# Altium footprint library UCP.PcbLib: 222 footprints (part 12 of 14)
Each footprint in its own frame and in the unit in brackets; x right, y up, seen from the top. Pads: shape width x height; smd on the part's side, far side on the other; paste and mask are expansions set on the pad; w line width, h text height; cw(c..) or ccw(c..) is an arc to the next point about the centre after c.
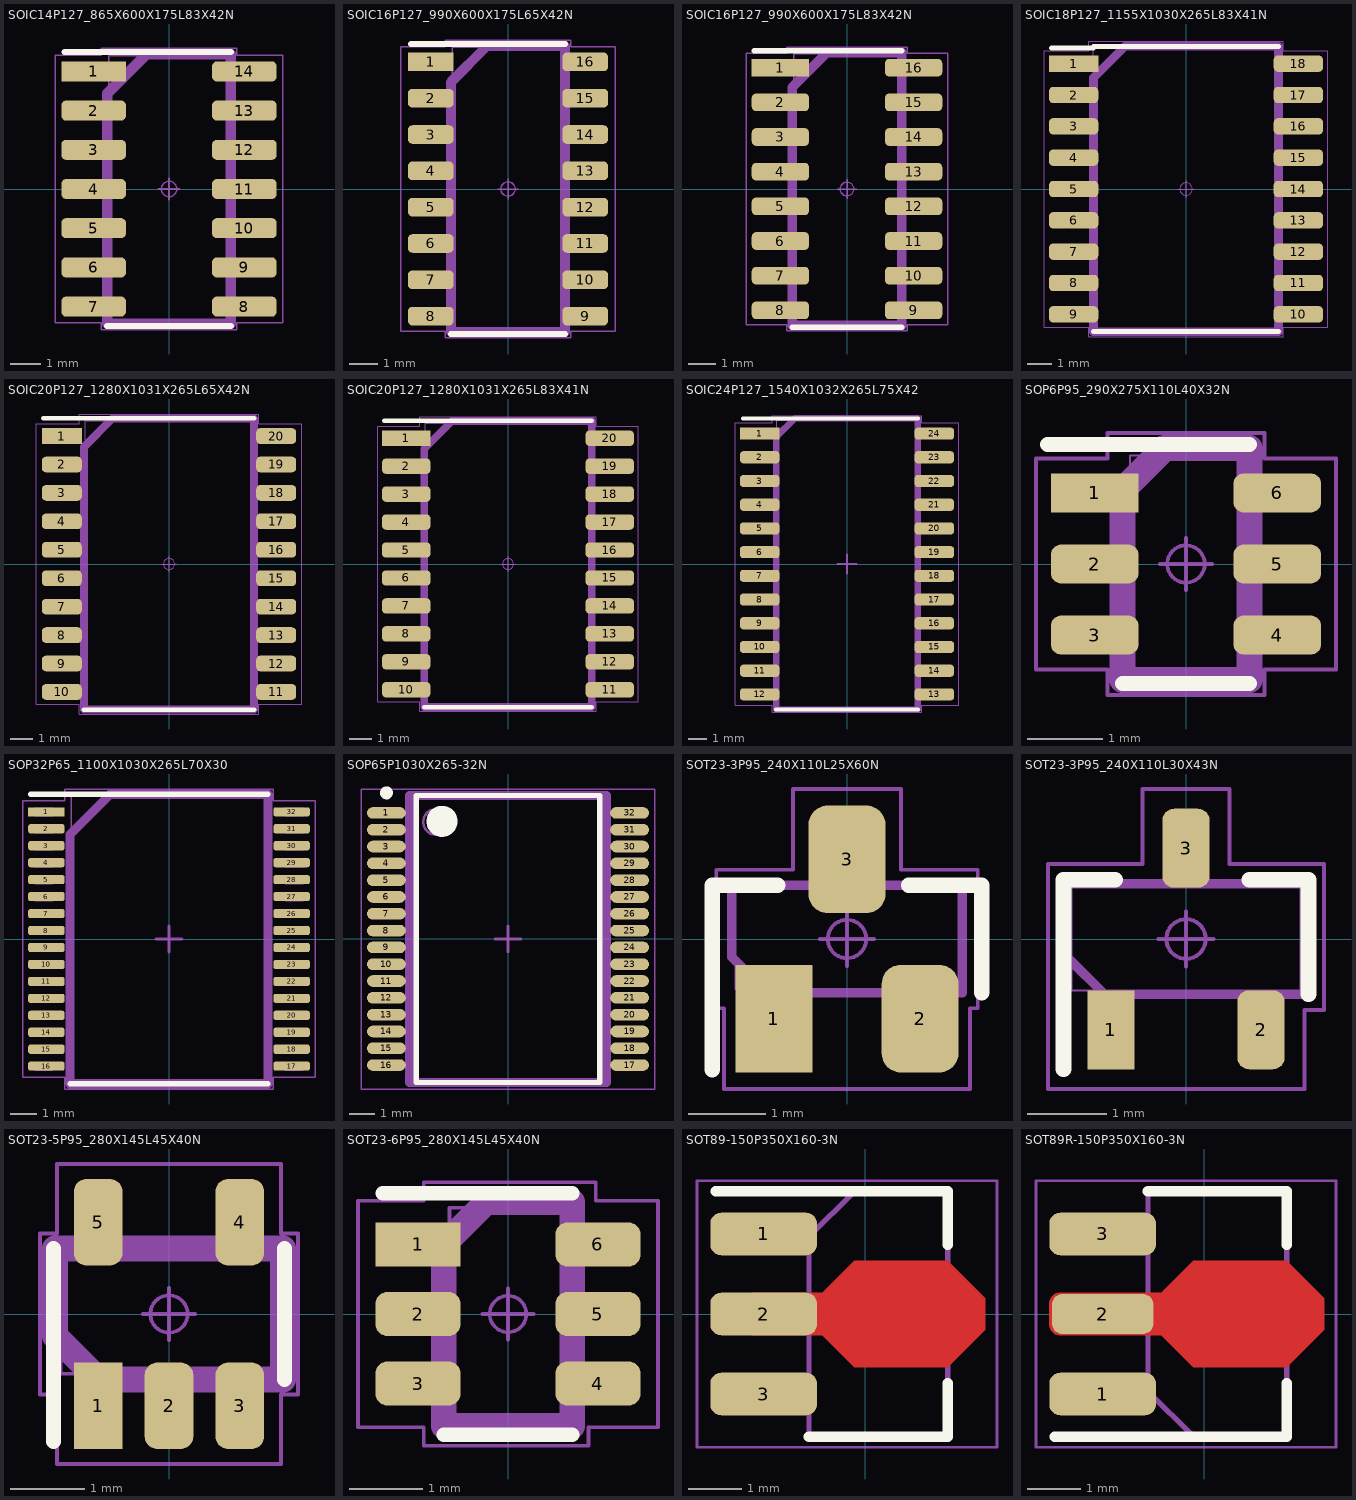
[diagram p11: the footprints below, top view; thin cyan lines are the x and y axes]

## SOIC14P127_865X600X175L83X42N [mm] "Small Outline IC (SOIC), 1.27 mm pitch; 14 pin, 8.65 mm L X 3.90 mm W X 1.75 mm H body"
height 1.75
pads (14):
  rect 2.1x0.65 smd: 1(-2.44,3.81)
  rrect49% 2.1x0.65 smd: 2(-2.44,2.54) 3(-2.44,1.27) 4(-2.44,0) 5(-2.44,-1.27) 6(-2.44,-2.54) 7(-2.44,-3.81) 8(2.44,-3.81) 9(2.44,-2.54) 10(2.44,-1.27) 11(2.44,0) 12(2.44,1.27) 13(2.44,2.54) 14(2.44,3.81)
Top Overlay:
  lines w0.2: -3.39,4.435 -2,4.435 2,4.435 ; -2,-4.435 2,-4.435
Top Designator:
  text ".Designator" at -4.511,-0.453 h2
Top Assembly:
  lines w0.35: -2,-4.365 -2,3.095 -0.73,4.365 2,4.365 2,-4.365 -2,-4.365
Top Courtyard:
  circle w0.05: c0,0 r0.25
  lines w0.05: -0.35,0 0.35,0 ; 0,-0.35 0,0.35 ; -3.69,-4.335 -3.69,4.335 -2.2,4.335 -2.2,4.565 2.2,4.565 2.2,4.335 3.69,4.335 3.69,-4.335 2.2,-4.335 2.2,-4.565 -2.2,-4.565 -2.2,-4.335 -3.69,-4.335
Top Component Outline:
  lines w0.05: -1.95,-4.315 -1.95,4.315 1.95,4.315 1.95,-4.315 -1.95,-4.315
Top Component Terminal:
  lines w0.05: -3,-4.02 -3,-3.6 -2.165,-3.6 -2.165,-4.02 -3,-4.02 ; -3,-2.75 -3,-2.33 -2.165,-2.33 -2.165,-2.75 -3,-2.75 ; -3,-1.48 -3,-1.06 -2.165,-1.06 -2.165,-1.48 -3,-1.48 ; -3,-0.21 -3,0.21 -2.165,0.21 -2.165,-0.21 -3,-0.21 ; -3,1.06 -3,1.48 -2.165,1.48 -2.165,1.06 -3,1.06 ; -3,2.33 -3,2.75 -2.165,2.75 -2.165,2.33 -3,2.33 ; -3,3.6 -3,4.02 -2.165,4.02 -2.165,3.6 -3,3.6 ; 2.165,-4.02 3,-4.02 3,-3.6 2.165,-3.6 2.165,-4.02 ; 2.165,-2.75 3,-2.75 3,-2.33 2.165,-2.33 2.165,-2.75 ; 2.165,-1.48 3,-1.48 3,-1.06 2.165,-1.06 2.165,-1.48 ; 2.165,-0.21 3,-0.21 3,0.21 2.165,0.21 2.165,-0.21 ; 2.165,1.06 3,1.06 3,1.48 2.165,1.48 2.165,1.06 ; 2.165,2.33 3,2.33 3,2.75 2.165,2.75 2.165,2.33 ; 2.165,3.6 3,3.6 3,4.02 2.165,4.02 2.165,3.6
3D body "SOIC14P127_865X600X175L70X42.STEP": height 1.75, standoff 0, extent -3,-4.325 3,4.325

## SOIC16P127_990X600X175L65X42N [mm] "Small Outline IC (SOIC), 1.27 mm pitch; 16 pin, 9.90 mm L X 3.90 mm W X 1.75 mm H body"
height 1.75
pads (16):
  rect 1.6x0.65 smd: 1(-2.7,4.445)
  rrect49% 1.6x0.65 smd: 2(-2.7,3.175) 3(-2.7,1.905) 4(-2.7,0.635) 5(-2.7,-0.635) 6(-2.7,-1.905) 7(-2.7,-3.175) 8(-2.7,-4.445) 9(2.7,-4.445) 10(2.7,-3.175) 11(2.7,-1.905) 12(2.7,-0.635) 13(2.7,0.635) 14(2.7,1.905) 15(2.7,3.175) 16(2.7,4.445)
Top Overlay:
  lines w0.2: -3.39,5.07 -2,5.07 2,5.07 ; -2,-5.07 2,-5.07
Top Designator:
  text ".Designator" at 0,0 h2.5
Top Assembly:
  lines w0.35: -2,-5 -2,3.73 -0.73,5 2,5 2,-5 -2,-5
Top Courtyard:
  circle w0.05: c0,0 r0.25
  lines w0.05: -0.35,0 0.35,0 ; 0,-0.35 0,0.35 ; -3.75,-4.97 -3.75,4.97 -2.2,4.97 -2.2,5.2 2.2,5.2 2.2,4.97 3.75,4.97 3.75,-4.97 2.2,-4.97 2.2,-5.2 -2.2,-5.2 -2.2,-4.97 -3.75,-4.97
Top Component Outline:
  lines w0.05: -1.95,-4.95 -1.95,4.95 1.95,4.95 1.95,-4.95 -1.95,-4.95
Top Component Terminal:
  lines w0.05: -3,-4.655 -2.165,-4.655 -2.165,-4.235 -3,-4.235 -3,-4.655 ; -3,-3.385 -2.165,-3.385 -2.165,-2.965 -3,-2.965 -3,-3.385 ; -3,-2.115 -2.165,-2.115 -2.165,-1.695 -3,-1.695 -3,-2.115 ; -3,-0.845 -2.165,-0.845 -2.165,-0.425 -3,-0.425 -3,-0.845 ; -3,0.425 -2.165,0.425 -2.165,0.845 -3,0.845 -3,0.425 ; -3,1.695 -2.165,1.695 -2.165,2.115 -3,2.115 -3,1.695 ; -3,2.965 -2.165,2.965 -2.165,3.385 -3,3.385 -3,2.965 ; -3,4.235 -2.165,4.235 -2.165,4.655 -3,4.655 -3,4.235 ; 2.165,-4.655 2.165,-4.235 3,-4.235 3,-4.655 2.165,-4.655 ; 2.165,-3.385 2.165,-2.965 3,-2.965 3,-3.385 2.165,-3.385 ; 2.165,-2.115 2.165,-1.695 3,-1.695 3,-2.115 2.165,-2.115 ; 2.165,-0.845 2.165,-0.425 3,-0.425 3,-0.845 2.165,-0.845 ; 2.165,0.425 2.165,0.845 3,0.845 3,0.425 2.165,0.425 ; 2.165,1.695 2.165,2.115 3,2.115 3,1.695 2.165,1.695 ; 2.165,2.965 2.165,3.385 3,3.385 3,2.965 2.165,2.965 ; 2.165,4.235 2.165,4.655 3,4.655 3,4.235 2.165,4.235
3D body "SOIC16P127_990X600X175L83X42.STEP": height 1.75, standoff 0, extent -3,-4.95 3,4.95

## SOIC16P127_990X600X175L83X42N [mm] "Small Outline IC (SOIC), 1.27 mm pitch; 16 pin, 9.90 mm L X 3.90 mm W X 1.75 mm H body"
height 1.75
pads (16):
  rect 2.1x0.65 smd: 1(-2.44,4.445)
  rrect49% 2.1x0.65 smd: 2(-2.44,3.175) 3(-2.44,1.905) 4(-2.44,0.635) 5(-2.44,-0.635) 6(-2.44,-1.905) 7(-2.44,-3.175) 8(-2.44,-4.445) 9(2.44,-4.445) 10(2.44,-3.175) 11(2.44,-1.905) 12(2.44,-0.635) 13(2.44,0.635) 14(2.44,1.905) 15(2.44,3.175) 16(2.44,4.445)
Top Overlay:
  lines w0.2: -3.39,5.07 -2,5.07 2,5.07 ; -2,-5.07 2,-5.07
Top Designator:
  text ".Designator" at 0,0 h2.5
Top Assembly:
  lines w0.35: -2,-5 2,-5 2,5 -0.73,5 -2,3.73 -2,-5
Top Courtyard:
  circle w0.05: c0,0 r0.25
  lines w0.05: -0.35,0 0.35,0 ; 0,-0.35 0,0.35 ; -3.69,-4.97 -2.2,-4.97 -2.2,-5.2 2.2,-5.2 2.2,-4.97 3.69,-4.97 3.69,4.97 2.2,4.97 2.2,5.2 -2.2,5.2 -2.2,4.97 -3.69,4.97 -3.69,-4.97
Top Component Outline:
  lines w0.05: -1.95,-4.95 1.95,-4.95 1.95,4.95 -1.95,4.95 -1.95,-4.95
Top Component Terminal:
  lines w0.05: -3,-4.655 -3,-4.235 -2.165,-4.235 -2.165,-4.655 -3,-4.655 ; -3,-3.385 -3,-2.965 -2.165,-2.965 -2.165,-3.385 -3,-3.385 ; -3,-2.115 -3,-1.695 -2.165,-1.695 -2.165,-2.115 -3,-2.115 ; -3,-0.845 -3,-0.425 -2.165,-0.425 -2.165,-0.845 -3,-0.845 ; -3,0.425 -3,0.845 -2.165,0.845 -2.165,0.425 -3,0.425 ; -3,1.695 -3,2.115 -2.165,2.115 -2.165,1.695 -3,1.695 ; -3,2.965 -3,3.385 -2.165,3.385 -2.165,2.965 -3,2.965 ; -3,4.235 -3,4.655 -2.165,4.655 -2.165,4.235 -3,4.235 ; 2.165,-4.655 3,-4.655 3,-4.235 2.165,-4.235 2.165,-4.655 ; 2.165,-3.385 3,-3.385 3,-2.965 2.165,-2.965 2.165,-3.385 ; 2.165,-2.115 3,-2.115 3,-1.695 2.165,-1.695 2.165,-2.115 ; 2.165,-0.845 3,-0.845 3,-0.425 2.165,-0.425 2.165,-0.845 ; 2.165,0.425 3,0.425 3,0.845 2.165,0.845 2.165,0.425 ; 2.165,1.695 3,1.695 3,2.115 2.165,2.115 2.165,1.695 ; 2.165,2.965 3,2.965 3,3.385 2.165,3.385 2.165,2.965 ; 2.165,4.235 3,4.235 3,4.655 2.165,4.655 2.165,4.235
3D body "SOIC16P127_990X600X175L83X42.STEP": height 1.75, standoff 0, extent -3,-4.95 3,4.95

## SOIC18P127_1155X1030X265L83X41N [mm] "Small Outline IC (SOIC), 1.27 mm pitch; 18 pin, 11.55 mm L X 7.50 mm W X 2.65 mm H body"
height 2.65
pads (18):
  rect 2x0.66 smd: 1(-4.555,5.08)
  rrect52% 2x0.66 smd: 2(-4.555,3.81) 3(-4.555,2.54) 4(-4.555,1.27) 5(-4.555,0) 6(-4.555,-1.27) 7(-4.555,-2.54) 8(-4.555,-3.81) 9(-4.555,-5.08) 10(4.555,-5.08) 11(4.555,-3.81) 12(4.555,-2.54) 13(4.555,-1.27) 14(4.555,0) 15(4.555,1.27) 16(4.555,2.54) 17(4.555,3.81) 18(4.555,5.08)
Top Overlay:
  lines w0.2: -5.455,5.71 -3.75,5.71 ; -3.75,-5.78 3.75,-5.78 ; -3.75,5.78 3.75,5.78
Top Designator:
  text ".Designator" at 0,0 h1.2
Top Assembly:
  lines w0.35: -3.75,-5.78 3.75,-5.78 3.75,5.78 -2.48,5.78 -3.75,4.51 -3.75,-5.78
Top Courtyard:
  circle w0.05: c0,0 r0.25
  lines w0.05: -0.35,0 0.35,0 ; 0,-0.35 0,0.35 ; -5.755,-5.61 -3.95,-5.61 -3.95,-5.98 3.95,-5.98 3.95,-5.61 5.755,-5.61 5.755,5.61 3.95,5.61 3.95,5.98 -3.95,5.98 -3.95,5.61 -5.755,5.61 -5.755,-5.61
Top Component Outline:
  lines w0.025: -3.75,-5.775 3.75,-5.775 3.75,5.775 -3.75,5.775 -3.75,-5.775
Top Component Terminal:
  lines w0.025: -5.15,-5.285 -5.15,-4.875 -4.315,-4.875 -4.315,-5.285 -5.15,-5.285 ; -5.15,-4.015 -5.15,-3.605 -4.315,-3.605 -4.315,-4.015 -5.15,-4.015 ; -5.15,-2.745 -5.15,-2.335 -4.315,-2.335 -4.315,-2.745 -5.15,-2.745 ; -5.15,-1.475 -5.15,-1.065 -4.315,-1.065 -4.315,-1.475 -5.15,-1.475 ; -5.15,-0.205 -5.15,0.205 -4.315,0.205 -4.315,-0.205 -5.15,-0.205 ; -5.15,1.065 -5.15,1.475 -4.315,1.475 -4.315,1.065 -5.15,1.065 ; -5.15,2.335 -5.15,2.745 -4.315,2.745 -4.315,2.335 -5.15,2.335 ; -5.15,3.605 -5.15,4.015 -4.315,4.015 -4.315,3.605 -5.15,3.605 ; -5.15,4.875 -5.15,5.285 -4.315,5.285 -4.315,4.875 -5.15,4.875 ; 4.315,-5.285 5.15,-5.285 5.15,-4.875 4.315,-4.875 4.315,-5.285 ; 4.315,-4.015 5.15,-4.015 5.15,-3.605 4.315,-3.605 4.315,-4.015 ; 4.315,-2.745 5.15,-2.745 5.15,-2.335 4.315,-2.335 4.315,-2.745 ; 4.315,-1.475 5.15,-1.475 5.15,-1.065 4.315,-1.065 4.315,-1.475 ; 4.315,-0.205 5.15,-0.205 5.15,0.205 4.315,0.205 4.315,-0.205 ; 4.315,1.065 5.15,1.065 5.15,1.475 4.315,1.475 4.315,1.065 ; 4.315,2.335 5.15,2.335 5.15,2.745 4.315,2.745 4.315,2.335 ; 4.315,3.605 5.15,3.605 5.15,4.015 4.315,4.015 4.315,3.605 ; 4.315,4.875 5.15,4.875 5.15,5.285 4.315,5.285 4.315,4.875
3D body: height 0.25, standoff 0, extent 0,0 0.254,0.254
3D body "SOIC18P127_1155X1030X265L83X41.STEP": height 2.65, standoff 0, extent -5.15,-5.775 5.15,5.775

## SOIC20P127_1280X1031X265L65X42N [mm] "Small Outline IC (SOIC), 1.27 mm pitch; 20 pin, 12.80 mm L X 7.50 mm W X 2.65 mm H body"
height 2.65
pads (20):
  rect 1.78x0.7 smd: 1(-4.787,5.715)
  rrect51% 1.78x0.7 smd: 2(-4.787,4.445) 3(-4.787,3.175) 4(-4.787,1.905) 5(-4.787,0.635) 6(-4.787,-0.635) 7(-4.787,-1.905) 8(-4.787,-3.175) 9(-4.787,-4.445) 10(-4.787,-5.715) 11(4.787,-5.715) 12(4.787,-4.445) 13(4.787,-3.175) 14(4.787,-1.905) 15(4.787,-0.635) 16(4.787,0.635) 17(4.787,1.905) 18(4.787,3.175) 19(4.787,4.445) 20(4.787,5.715)
Top Overlay:
  lines w0.2: -5.62,6.5 3.8,6.5 ; -3.8,-6.5 3.8,-6.5
Top Designator:
  text ".Designator" at 0,0 h1.5
Top Assembly:
  lines w0.35: -3.8,-6.5 -3.8,5.23 -2.53,6.5 3.8,6.5 3.8,-6.5 -3.8,-6.5
Top Courtyard:
  circle w0.05: c0,0 r0.25
  lines w0.05: -0.35,0 0.35,0 ; 0,-0.35 0,0.35 ; -5.92,-6.265 -5.92,6.265 -4,6.265 -4,6.7 4,6.7 4,6.265 5.92,6.265 5.92,-6.265 4,-6.265 4,-6.7 -4,-6.7 -4,-6.265 -5.92,-6.265
Top Component Outline:
  lines w0.05: -3.75,-6.4 -3.75,6.4 3.75,6.4 3.75,-6.4 -3.75,-6.4
Top Component Terminal:
  lines w0.05: -5.155,-5.92 -4.32,-5.92 -4.32,-5.51 -5.155,-5.51 -5.155,-5.92 ; -5.155,-4.65 -4.32,-4.65 -4.32,-4.24 -5.155,-4.24 -5.155,-4.65 ; -5.155,-3.38 -4.32,-3.38 -4.32,-2.97 -5.155,-2.97 -5.155,-3.38 ; -5.155,-2.11 -4.32,-2.11 -4.32,-1.7 -5.155,-1.7 -5.155,-2.11 ; -5.155,-0.84 -4.32,-0.84 -4.32,-0.43 -5.155,-0.43 -5.155,-0.84 ; -5.155,0.43 -4.32,0.43 -4.32,0.84 -5.155,0.84 -5.155,0.43 ; -5.155,1.7 -4.32,1.7 -4.32,2.11 -5.155,2.11 -5.155,1.7 ; -5.155,2.97 -4.32,2.97 -4.32,3.38 -5.155,3.38 -5.155,2.97 ; -5.155,4.24 -4.32,4.24 -4.32,4.65 -5.155,4.65 -5.155,4.24 ; -5.155,5.51 -4.32,5.51 -4.32,5.92 -5.155,5.92 -5.155,5.51 ; 4.32,-5.92 4.32,-5.51 5.155,-5.51 5.155,-5.92 4.32,-5.92 ; 4.32,-4.65 4.32,-4.24 5.155,-4.24 5.155,-4.65 4.32,-4.65 ; 4.32,-3.38 4.32,-2.97 5.155,-2.97 5.155,-3.38 4.32,-3.38 ; 4.32,-2.11 4.32,-1.7 5.155,-1.7 5.155,-2.11 4.32,-2.11 ; 4.32,-0.84 4.32,-0.43 5.155,-0.43 5.155,-0.84 4.32,-0.84 ; 4.32,0.43 4.32,0.84 5.155,0.84 5.155,0.43 4.32,0.43 ; 4.32,1.7 4.32,2.11 5.155,2.11 5.155,1.7 4.32,1.7 ; 4.32,2.97 4.32,3.38 5.155,3.38 5.155,2.97 4.32,2.97 ; 4.32,4.24 4.32,4.65 5.155,4.65 5.155,4.24 4.32,4.24 ; 4.32,5.51 4.32,5.92 5.155,5.92 5.155,5.51 4.32,5.51
3D body "SOIC20P127_1280X1031X265L83X41N.STEP": height 2.65, standoff 0, extent -5.155,-6.4 5.155,6.4

## SOIC20P127_1280X1031X265L83X41N [mm] "Small Outline IC (SOIC), 1.27 mm pitch; 20 pin, 12.80 mm L X 7.50 mm W X 2.65 mm H body"
height 2.65
pads (20):
  rect 2.2x0.7 smd: 1(-4.62,5.715)
  rrect51% 2.2x0.7 smd: 2(-4.62,4.445) 3(-4.62,3.175) 4(-4.62,1.905) 5(-4.62,0.635) 6(-4.62,-0.635) 7(-4.62,-1.905) 8(-4.62,-3.175) 9(-4.62,-4.445) 10(-4.62,-5.715) 11(4.62,-5.715) 12(4.62,-4.445) 13(4.62,-3.175) 14(4.62,-1.905) 15(4.62,-0.635) 16(4.62,0.635) 17(4.62,1.905) 18(4.62,3.175) 19(4.62,4.445) 20(4.62,5.715)
Top Overlay:
  lines w0.2: -5.62,6.5 3.8,6.5 ; -3.8,-6.5 3.8,-6.5
Top Designator:
  text ".Designator" at 0,0 h1.5
Top Assembly:
  lines w0.35: -3.8,-6.5 3.8,-6.5 3.8,6.5 -2.53,6.5 -3.8,5.23 -3.8,-6.5
Top Courtyard:
  circle w0.05: c0,0 r0.25
  lines w0.05: -0.35,0 0.35,0 ; 0,-0.35 0,0.35 ; -5.92,-6.265 -4,-6.265 -4,-6.7 4,-6.7 4,-6.265 5.92,-6.265 5.92,6.265 4,6.265 4,6.7 -4,6.7 -4,6.265 -5.92,6.265 -5.92,-6.265
Top Component Outline:
  lines w0.05: -3.75,-6.4 3.75,-6.4 3.75,6.4 -3.75,6.4 -3.75,-6.4
Top Component Terminal:
  lines w0.05: -5.155,-5.92 -5.155,-5.51 -4.32,-5.51 -4.32,-5.92 -5.155,-5.92 ; -5.155,-4.65 -5.155,-4.24 -4.32,-4.24 -4.32,-4.65 -5.155,-4.65 ; -5.155,-3.38 -5.155,-2.97 -4.32,-2.97 -4.32,-3.38 -5.155,-3.38 ; -5.155,-2.11 -5.155,-1.7 -4.32,-1.7 -4.32,-2.11 -5.155,-2.11 ; -5.155,-0.84 -5.155,-0.43 -4.32,-0.43 -4.32,-0.84 -5.155,-0.84 ; -5.155,0.43 -5.155,0.84 -4.32,0.84 -4.32,0.43 -5.155,0.43 ; -5.155,1.7 -5.155,2.11 -4.32,2.11 -4.32,1.7 -5.155,1.7 ; -5.155,2.97 -5.155,3.38 -4.32,3.38 -4.32,2.97 -5.155,2.97 ; -5.155,4.24 -5.155,4.65 -4.32,4.65 -4.32,4.24 -5.155,4.24 ; -5.155,5.51 -5.155,5.92 -4.32,5.92 -4.32,5.51 -5.155,5.51 ; 4.32,-5.92 5.155,-5.92 5.155,-5.51 4.32,-5.51 4.32,-5.92 ; 4.32,-4.65 5.155,-4.65 5.155,-4.24 4.32,-4.24 4.32,-4.65 ; 4.32,-3.38 5.155,-3.38 5.155,-2.97 4.32,-2.97 4.32,-3.38 ; 4.32,-2.11 5.155,-2.11 5.155,-1.7 4.32,-1.7 4.32,-2.11 ; 4.32,-0.84 5.155,-0.84 5.155,-0.43 4.32,-0.43 4.32,-0.84 ; 4.32,0.43 5.155,0.43 5.155,0.84 4.32,0.84 4.32,0.43 ; 4.32,1.7 5.155,1.7 5.155,2.11 4.32,2.11 4.32,1.7 ; 4.32,2.97 5.155,2.97 5.155,3.38 4.32,3.38 4.32,2.97 ; 4.32,4.24 5.155,4.24 5.155,4.65 4.32,4.65 4.32,4.24 ; 4.32,5.51 5.155,5.51 5.155,5.92 4.32,5.92 4.32,5.51
3D body "SOIC20P127_1280X1031X265L83X41N.STEP": height 2.65, standoff 0, extent -5.155,-6.4 5.155,6.4

## SOIC24P127_1540X1032X265L75X42 [mm] "SOIC, 24-Leads, Body 15,40x7,50mm, Pitch 1,27mm, IPC Medium Density"
height 2.65
pads (24):
  rect 2.1x0.65 smd: 1(-4.675,6.985)
  rrect50% 2.1x0.65 smd: 2(-4.675,5.715) 3(-4.675,4.445) 4(-4.675,3.175) 5(-4.675,1.905) 6(-4.675,0.635) 7(-4.675,-0.635) 8(-4.675,-1.905) 9(-4.675,-3.175) 10(-4.675,-4.445) 11(-4.675,-5.715) 12(-4.675,-6.985) 13(4.675,-6.985) 14(4.675,-5.715) 15(4.675,-4.445) 16(4.675,-3.175) 17(4.675,-1.905) 18(4.675,-0.635) 19(4.675,0.635) 20(4.675,1.905) 21(4.675,3.175) 22(4.675,4.445) 23(4.675,5.715) 24(4.675,6.985)
Top Overlay:
  lines w0.2: -5.58,7.8 3.8,7.8 ; -3.8,-7.8 3.8,-7.8
Top Designator:
  text ".Designator" at -4.511,-0.453 h2
Top Assembly:
  lines w0.35: -3.8,-7.8 3.8,-7.8 3.8,7.8 -2.8,7.8 -3.8,6.8 -3.8,-7.8
Top Courtyard:
  lines w0.05: -5.975,-7.56 -4,-7.56 -4,-7.95 4,-7.95 4,-7.56 5.975,-7.56 5.975,7.56 4,7.56 4,7.95 -4,7.95 -4,7.56 -5.975,7.56 -5.975,-7.56
  lines w0.1: -0.5,0 0.5,0 ; 0,-0.5 0,0.5
Top Component Outline:
  lines w0.05: -3.75,-7.7 -3.75,7.7 3.75,7.7 3.75,-7.7 -3.75,-7.7
3D body "SOIC127P1030X265-24N.step": height 2.65, standoff 0, extent -5.162,-7.8 5.162,7.8

## SOP6P95_290X275X110L40X32N [mm] "Small Outline Pkg (SOP), 0.95 mm pitch; 6 pin, 2.90 mm L X 1.50 mm W X 1.10 mm H body"
height 1.1
pads (6):
  rect 1.17x0.52 smd: 1(-1.22,0.95)
  rrect50% 1.17x0.52 smd: 2(-1.22,0) 3(-1.22,-0.95) 4(1.22,-0.95) 5(1.22,0) 6(1.22,0.95)
Top Overlay:
  lines w0.2: -1.85,1.6 0.85,1.6 ; -0.85,-1.6 0.85,-1.6
Top Designator:
  text ".Designator" at 0,0 h1.2
Top Assembly:
  lines w0.35: -0.85,-1.55 -0.85,0.983 -0.283,1.55 0.85,1.55 0.85,-1.55 -0.85,-1.55
Top Courtyard:
  circle w0.05: c0,0 r0.25
  lines w0.05: -0.35,0 0.35,0 ; 0,-0.35 0,0.35 ; -2.005,-1.41 -2.005,1.41 -1.05,1.41 -1.05,1.75 1.05,1.75 1.05,1.41 2.005,1.41 2.005,-1.41 1.05,-1.41 1.05,-1.75 -1.05,-1.75 -1.05,-1.41 -2.005,-1.41
Top Component Outline:
  lines w0.025: -0.75,-1.45 -0.75,1.45 0.75,1.45 0.75,-1.45 -0.75,-1.45
Top Component Terminal:
  lines w0.025: -1.375,-1.112 -0.975,-1.112 -0.975,-0.787 -1.375,-0.787 -1.375,-1.112 ; -1.375,-0.162 -0.975,-0.162 -0.975,0.162 -1.375,0.162 -1.375,-0.162 ; -1.375,0.787 -0.975,0.787 -0.975,1.112 -1.375,1.112 -1.375,0.787 ; 0.975,-1.112 0.975,-0.787 1.375,-0.787 1.375,-1.112 0.975,-1.112 ; 0.975,-0.162 0.975,0.162 1.375,0.162 1.375,-0.162 0.975,-0.162 ; 0.975,0.787 0.975,1.112 1.375,1.112 1.375,0.787 0.975,0.787
3D body: height 0.25, standoff 0, extent 0,0 0.254,0.254
3D body "SOP6P95_290X275X110L40X32.STEP": height 1.1, standoff 0, extent -1.375,-1.45 1.375,1.45

## SOP32P65_1100X1030X265L70X30 [mm] "Small Outline Pkg (SOP), 0.65 mm pitch; 32 pin, 11.00 mm L X 7.50 mm W X 2.65 mm H body"
height 2.65
pads (32):
  rect 1.4x0.35 smd mask+0.055: 1(-4.7,4.875)
  rrect50% 1.4x0.35 smd mask+0.055: 2(-4.7,4.225) 3(-4.7,3.575) 4(-4.7,2.925) 5(-4.7,2.275) 6(-4.7,1.625) 7(-4.7,0.975) 8(-4.7,0.325) 9(-4.7,-0.325) 10(-4.7,-0.975) 11(-4.7,-1.625) 12(-4.7,-2.275) 13(-4.7,-2.925) 14(-4.7,-3.575) 15(-4.7,-4.225) 16(-4.7,-4.875) 17(4.7,-4.875) 18(4.7,-4.225) 19(4.7,-3.575) 20(4.7,-2.925) 21(4.7,-2.275) 22(4.7,-1.625) 23(4.7,-0.975) 24(4.7,-0.325) 25(4.7,0.325) 26(4.7,0.975) 27(4.7,1.625) 28(4.7,2.275) 29(4.7,2.925) 30(4.7,3.575) 31(4.7,4.225) 32(4.7,4.875)
Top Overlay:
  lines w0.2: -5.3,5.55 3.8,5.55 ; -3.8,-5.55 3.8,-5.55
Top Assembly:
  lines w0.35: -3.8,-5.55 3.8,-5.55 3.8,5.55 -2.25,5.55 -3.8,4 -3.8,-5.55
Top Courtyard:
  lines w0.05: -5.6,-5.3 -5.6,5.3 -4,5.3 -4,5.75 4,5.75 4,5.3 5.6,5.3 5.6,-5.3 4,-5.3 4,-5.75 -4,-5.75 -4,-5.3 -5.6,-5.3
  lines w0.1: -0.5,0 0.5,0 ; 0,-0.5 0,0.5
Top Component Outline:
  lines w0.05: -3.75,-5.5 3.75,-5.5 3.75,5.5 -3.75,5.5 -3.75,-5.5
Top Component Terminal:
  lines w0.025: -5.15,-5.025 -5.15,-4.725 -4.45,-4.725 -4.45,-5.025 -5.15,-5.025 ; -5.15,-4.375 -5.15,-4.075 -4.45,-4.075 -4.45,-4.375 -5.15,-4.375 ; -5.15,-3.725 -5.15,-3.425 -4.45,-3.425 -4.45,-3.725 -5.15,-3.725 ; -5.15,-3.075 -5.15,-2.775 -4.45,-2.775 -4.45,-3.075 -5.15,-3.075 ; -5.15,-2.425 -5.15,-2.125 -4.45,-2.125 -4.45,-2.425 -5.15,-2.425 ; -5.15,-1.775 -5.15,-1.475 -4.45,-1.475 -4.45,-1.775 -5.15,-1.775 ; -5.15,-1.125 -5.15,-0.825 -4.45,-0.825 -4.45,-1.125 -5.15,-1.125 ; -5.15,-0.475 -5.15,-0.175 -4.45,-0.175 -4.45,-0.475 -5.15,-0.475 ; -5.15,0.175 -5.15,0.475 -4.45,0.475 -4.45,0.175 -5.15,0.175 ; -5.15,0.825 -5.15,1.125 -4.45,1.125 -4.45,0.825 -5.15,0.825 ; -5.15,1.475 -5.15,1.775 -4.45,1.775 -4.45,1.475 -5.15,1.475 ; -5.15,2.125 -5.15,2.425 -4.45,2.425 -4.45,2.125 -5.15,2.125 ; -5.15,2.775 -5.15,3.075 -4.45,3.075 -4.45,2.775 -5.15,2.775 ; -5.15,3.425 -5.15,3.725 -4.45,3.725 -4.45,3.425 -5.15,3.425 ; -5.15,4.075 -5.15,4.375 -4.45,4.375 -4.45,4.075 -5.15,4.075 ; -5.15,4.725 -5.15,5.025 -4.45,5.025 -4.45,4.725 -5.15,4.725 ; 4.45,-5.025 5.15,-5.025 5.15,-4.725 4.45,-4.725 4.45,-5.025 ; 4.45,-4.375 5.15,-4.375 5.15,-4.075 4.45,-4.075 4.45,-4.375 ; 4.45,-3.725 5.15,-3.725 5.15,-3.425 4.45,-3.425 4.45,-3.725 ; 4.45,-3.075 5.15,-3.075 5.15,-2.775 4.45,-2.775 4.45,-3.075 ; 4.45,-2.425 5.15,-2.425 5.15,-2.125 4.45,-2.125 4.45,-2.425 ; 4.45,-1.775 5.15,-1.775 5.15,-1.475 4.45,-1.475 4.45,-1.775 ; 4.45,-1.125 5.15,-1.125 5.15,-0.825 4.45,-0.825 4.45,-1.125 ; 4.45,-0.475 5.15,-0.475 5.15,-0.175 4.45,-0.175 4.45,-0.475 ; 4.45,0.175 5.15,0.175 5.15,0.475 4.45,0.475 4.45,0.175 ; 4.45,0.825 5.15,0.825 5.15,1.125 4.45,1.125 4.45,0.825 ; 4.45,1.475 5.15,1.475 5.15,1.775 4.45,1.775 4.45,1.475 ; 4.45,2.125 5.15,2.125 5.15,2.425 4.45,2.425 4.45,2.125 ; 4.45,2.775 5.15,2.775 5.15,3.075 4.45,3.075 4.45,2.775 ; 4.45,3.425 5.15,3.425 5.15,3.725 4.45,3.725 4.45,3.425 ; 4.45,4.075 5.15,4.075 5.15,4.375 4.45,4.375 4.45,4.075 ; 4.45,4.725 5.15,4.725 5.15,5.025 4.45,5.025 4.45,4.725
3D body "SOP65P1030X265-32N.step": height 2.65, standoff 0, extent -5.15,-5.55 5.15,5.55

## SOP65P1030X265-32N [mm] "SOP, 32-Leads, Body 11,00x7,50mm, Pitch 0,65mm, IPC Medium Density"
height 2.65
pads (32):
  oval 1.5x0.45 smd: 1(-4.7,4.875) 2(-4.7,4.225) 3(-4.7,3.575) 4(-4.7,2.925) 5(-4.7,2.275) 6(-4.7,1.625) 7(-4.7,0.975) 8(-4.7,0.325) 9(-4.7,-0.325) 10(-4.7,-0.975) 11(-4.7,-1.625) 12(-4.7,-2.275) 13(-4.7,-2.925) 14(-4.7,-3.575) 15(-4.7,-4.225) 16(-4.7,-4.875) 17(4.7,-4.875) 18(4.7,-4.225) 19(4.7,-3.575) 20(4.7,-2.925) 21(4.7,-2.275) 22(4.7,-1.625) 23(4.7,-0.975) 24(4.7,-0.325) 25(4.7,0.325) 26(4.7,0.975) 27(4.7,1.625) 28(4.7,2.275) 29(4.7,2.925) 30(4.7,3.575) 31(4.7,4.225) 32(4.7,4.875)
Top Overlay:
  circle w0.6: c-2.55,4.55 r0.3
  circle w0.25: c-4.7,5.65 r0.125
  lines w0.2: -3.55,-5.55 3.55,-5.55 3.55,5.55 -3.55,5.55 -3.55,-5.55
Top Assembly:
  circle w0.1: c-2.775,4.525 r0.5
  lines w0.35: -3.8,-5.55 3.8,-5.55 3.8,5.55 -3.8,5.55 -3.8,-5.55
Top Courtyard:
  lines w0.05: -5.675,-5.8 5.675,-5.8 5.675,5.8 -5.675,5.8 -5.675,-5.8
  lines w0.1: -0.5,0 0.5,0 ; 0,-0.5 0,0.5
3D body "SOP65P1030X265-32N.step": height 2.65, standoff 0, extent -5.15,-5.55 5.15,5.55

## SOT23-3P95_240X110L25X60N [mm] "Small Outline Transistor (SOT23), 0.95 mm pitch; 3 pin, 2.90 mm L X 1.30 mm W X 1.10 mm H body"
height 1.1
pads (3):
  rect 1x1.4 smd: 1(-0.95,-1.035)
  rrect50% 1x1.4 smd: 2(0.95,-1.035) 3(0,1.035)
Top Overlay:
  lines w0.2: -1.75,-1.7 -1.75,-0.7 -1.75,0.7 -0.9,0.7 ; 0.8,0.7 1.75,0.7 1.75,-0.7
Top Designator:
  text ".Designator" at -4.511,-0.453 h2
Top Assembly:
  lines w0.12: -1.5,-0.233 -1.033,-0.7 1.5,-0.7 1.5,0.7 -1.5,0.7 -1.5,-0.233
Top Courtyard:
  circle w0.05: c0,0 r0.25
  lines w0.05: -0.35,0 0.35,0 ; 0,-0.35 0,0.35 ; -1.7,-0.9 -1.7,0.9 -0.7,0.9 -0.7,1.95 0.7,1.95 0.7,0.9 1.7,0.9 1.7,-0.9 1.6,-0.9 1.6,-1.95 -1.6,-1.95 -1.6,-0.9 -1.7,-0.9
Top Component Outline:
  lines w0.025: -1.45,-0.65 -1.45,0.65 1.45,0.65 1.45,-0.65 -1.45,-0.65
Top Component Terminal:
  lines w0.025: -1.252,-1.35 -0.647,-1.35 -0.647,-0.45 -1.252,-0.45 -1.252,-1.35 ; -0.302,0.45 0.302,0.45 0.302,1.35 -0.302,1.35 -0.302,0.45 ; 0.647,-1.35 1.252,-1.35 1.252,-0.45 0.647,-0.45 0.647,-1.35
3D body "SOT23-3P95_240X110L25X60.STEP": height 1.1, standoff 0, extent -1.45,-1.2 1.45,1.2

## SOT23-3P95_240X110L30X43N [mm] "Small Outline Transistor (SOT23), 0.95 mm pitch; 3 pin, 2.90 mm L X 1.30 mm W X 1.10 mm H body"
height 1.1
pads (3):
  rect 0.6x1 smd: 1(-0.95,-1.15)
  rrect50% 0.6x1 smd: 2(0.95,-1.15) 3(0,1.15)
Top Overlay:
  lines w0.2: -1.55,-1.65 -1.55,-0.5 -1.55,0.75 -0.9,0.75 ; 0.8,0.75 1.55,0.75 ; 1.55,-0.7 1.55,0.75 ; 1.55,0.75 1.55,0.75
Top Designator:
  text ".Designator" at -4.511,-0.453 h2
Top Assembly:
  lines w0.12: -1.5,-0.233 -1.5,0.7 1.5,0.7 1.5,-0.7 -1.033,-0.7 -1.5,-0.233
Top Courtyard:
  circle w0.05: c0,0 r0.25
  lines w0.05: -0.35,0 0.35,0 ; 0,-0.35 0,0.35 ; -1.75,-1.9 1.5,-1.9 1.5,-0.9 1.75,-0.9 1.75,0.95 0.55,0.95 0.55,1.9 -0.55,1.9 -0.55,0.95 -1.75,0.95 -1.75,-0.9 -1.75,-1.9
Top Component Outline:
  lines w0.025: -1.45,-0.65 1.45,-0.65 1.45,0.65 -1.45,0.65 -1.45,-0.65
Top Component Terminal:
  lines w0.025: -1.165,-1.15 -1.165,-0.85 -0.735,-0.85 -0.735,-1.15 -1.165,-1.15 ; -0.215,0.85 -0.215,1.15 0.215,1.15 0.215,0.85 -0.215,0.85 ; 0.735,-1.15 1.165,-1.15 1.165,-0.85 0.735,-0.85 0.735,-1.15
3D body "SOT23-3P95_240X110L25X60.STEP": height 1.1, standoff 0, extent -1.45,-1.2 1.45,1.2

## SOT23-5P95_280X145L45X40N [mm] "Small Outline Transistor (SOT23), 0.95 mm pitch; 5 pin, 2.90 mm L X 1.60 mm W X 1.45 mm H body"
height 1.45
pads (5):
  rect 0.65x1.16 smd: 1(-0.95,-1.23)
  rrect51% 0.65x1.16 smd: 2(0,-1.23) 3(0.95,-1.23) 4(0.95,1.23) 5(-0.95,1.23)
Top Overlay:
  lines w0.2: -1.55,-1.71 -1.55,-0.88 -1.55,0.88 ; 1.55,-0.88 1.55,0.88
Top Designator:
  text ".Designator" at 0,0 h1.2
Top Assembly:
  lines w0.35: -1.53,-0.293 -0.943,-0.88 1.53,-0.88 1.53,0.88 -1.53,0.88 -1.53,-0.293
Top Courtyard:
  circle w0.05: c0,0 r0.25
  lines w0.05: -0.35,0 0.35,0 ; 0,-0.35 0,0.35 ; -1.73,-1.08 -1.73,1.08 -1.5,1.08 -1.5,2.01 1.5,2.01 1.5,1.08 1.73,1.08 1.73,-1.08 1.5,-1.08 1.5,-2.01 -1.5,-2.01 -1.5,-1.08 -1.73,-1.08
Top Component Outline:
  lines w0.05: -1.45,-0.8 -1.45,0.8 1.45,0.8 1.45,-0.8 -1.45,-0.8
Top Component Terminal:
  lines w0.05: -1.15,-1.4 -0.75,-1.4 -0.75,-0.95 -1.15,-0.95 -1.15,-1.4 ; -1.15,0.95 -0.75,0.95 -0.75,1.4 -1.15,1.4 -1.15,0.95 ; -0.2,-1.4 0.2,-1.4 0.2,-0.95 -0.2,-0.95 -0.2,-1.4 ; 0.75,-1.4 1.15,-1.4 1.15,-0.95 0.75,-0.95 0.75,-1.4 ; 0.75,0.95 1.15,0.95 1.15,1.4 0.75,1.4 0.75,0.95
3D body "SOT23-5P95_280X145L45X40.STEP": height 1.45, standoff 0, extent -1.45,-1.4 1.45,1.4

## SOT23-6P95_280X145L45X40N [mm] "Small Outline Transistor (SOT23), 0.95 mm pitch; 6 pin, 2.90 mm L X 1.60 mm W X 1.45 mm H body"
height 1.45
pads (6):
  rect 1.16x0.6 smd mask+0.05: 1(-1.23,0.95)
  rrect51% 1.16x0.6 smd mask+0.05: 2(-1.23,0) 3(-1.23,-0.95) 4(1.23,-0.95) 5(1.23,0) 6(1.23,0.95)
Top Overlay:
  lines w0.2: -1.71,1.65 -0.88,1.65 0.88,1.65 ; -0.88,-1.65 0.88,-1.65
Top Designator:
  text ".Designator" at 0,0 h1.2
Top Assembly:
  lines w0.35: -0.88,-1.53 -0.88,0.943 -0.293,1.53 0.88,1.53 0.88,-1.53 -0.88,-1.53
Top Courtyard:
  circle w0.05: c0,0 r0.25
  lines w0.05: -0.35,0 0.35,0 ; 0,-0.35 0,0.35 ; -2.05,-1.55 -1.15,-1.55 -1.15,-1.8 1.1,-1.8 1.1,-1.55 2.05,-1.55 2.05,1.55 1.2,1.55 1.2,1.8 -1.15,1.8 -1.15,1.55 -2.05,1.55 -2.05,-1.55
Top Component Outline:
  lines w0.05: -0.8,-1.45 -0.8,1.45 0.8,1.45 0.8,-1.45 -0.8,-1.45
Top Component Terminal:
  lines w0.05: -1.4,-1.15 -1.4,-0.75 -0.95,-0.75 -0.95,-1.15 -1.4,-1.15 ; -1.4,-0.2 -1.4,0.2 -0.95,0.2 -0.95,-0.2 -1.4,-0.2 ; -1.4,0.75 -1.4,1.15 -0.95,1.15 -0.95,0.75 -1.4,0.75 ; 0.95,-1.15 1.4,-1.15 1.4,-0.75 0.95,-0.75 0.95,-1.15 ; 0.95,0.75 1.4,0.75 1.4,1.15 0.95,1.15 0.95,0.75
3D body "SOT23-5P95_280X145L45X40.STEP": height 1.45, standoff 0, extent -1.4,-1.45 1.4,1.45

## SOT89-150P350X160-3N [mm] "SOT89, 3-Leads, Body 4,50x2,50mm, Pitch 1,50mm, Lead Span 3,5mm , IPC Medium Density"
height 1.6
pads (3):
  rrect50% 2x0.8 smd: 1(-1.9,1.5) 2(-1.9,0) 3(-1.9,-1.5)
Top Layer:
  region: -0.8,0.4 -0.2,1 1.55,1 2.25,0.3 2.25,-0.3 1.55,-1 -0.2,-1 -0.8,-0.4 -2.1,-0.4 -2.116,-0.397 -2.147,-0.385 -2.176,-0.367 -2.201,-0.345 -2.222,-0.319 -2.238,-0.29 -2.249,-0.258 -2.254,-0.225 -2.254,-0.209 -2.254,0.212 -2.254,0.229 -2.248,0.261 -2.237,0.292 -2.221,0.321 -2.2,0.346 -2.175,0.368 -2.147,0.385 -2.116,0.397 -2.1,0.4
Top Overlay:
  lines w0.2: -2.8,2.3 1.55,2.3 1.55,1.3 ; -1.05,-2.3 1.55,-2.3 1.55,-1.3
Top Designator:
  text ".Designator" at -4.511,-0.453 h2
Top Assembly:
  lines w0.1: -1.05,-2.3 -1.05,1.45 -0.2,2.3 1.55,2.3 1.55,-2.3 -1.05,-2.3
Top Courtyard:
  lines w0.05: -3.15,-2.5 -3.15,2.5 2.475,2.5 2.475,-2.5 -3.15,-2.5
  lines w0.1: -0.5,0 0.5,0 ; 0,-0.5 0,0.5
3D body "SOT89R-150P350X160-3N.step": height 1.6, standoff 0, extent -2.2,-2.297 1.39,2.297

## SOT89R-150P350X160-3N [mm] "SOT89, 3-Leads, Body 4,50x2,50mm, Pitch 1,50mm, Lead Span 3,5mm - Reverse Pinning, IPC Medium Density"
height 1.6
pads (3):
  rrect50% 2x0.8 smd: 1(-1.9,-1.5) 3(-1.9,1.5)
  rrect50% 1.9x0.75 smd: 2(-1.9,0)
Top Layer:
  region: -0.8,0.4 -0.2,1 1.55,1 2.25,0.3 2.25,-0.3 1.55,-1 -0.2,-1 -0.8,-0.4 -2.7,-0.4 -2.72,-0.4 -2.758,-0.392 -2.795,-0.377 -2.827,-0.355 -2.855,-0.328 -2.877,-0.295 -2.892,-0.258 -2.9,-0.22 -2.9,-0.2 -2.9,0.2 -2.9,0.22 -2.892,0.258 -2.877,0.295 -2.855,0.327 -2.828,0.355 -2.795,0.377 -2.758,0.392 -2.72,0.4 -2.7,0.4
Top Overlay:
  lines w0.2: -2.8,-2.3 1.55,-2.3 1.55,-1.3 ; -1.05,2.3 1.55,2.3 1.55,1.3
Top Designator:
  text ".Designator" at -4.511,-0.453 h2
Top Assembly:
  lines w0.1: -1.05,-1.45 -1.05,2.3 1.55,2.3 1.55,-2.3 -0.2,-2.3 -1.05,-1.45
Top Courtyard:
  lines w0.05: -3.15,-2.5 -3.15,2.5 2.475,2.5 2.475,-2.5 -3.15,-2.5
  lines w0.1: -0.5,0 0.5,0 ; 0,-0.5 0,0.5
3D body "SOT89R-150P350X160-3N.step": height 1.6, standoff 0, extent -2.2,-2.297 1.39,2.297